# Altium footprint library LimeMicroAltiumLib.PcbLib: 876 footprints (part 5 of 57)
Each footprint in its own frame and in the unit in brackets; x right, y up, seen from the top. Pads: shape width x height; smd on the part's side, far side on the other; paste and mask are expansions set on the pad; w line width, h text height; cw(c..) or ccw(c..) is an arc to the next point about the centre after c.
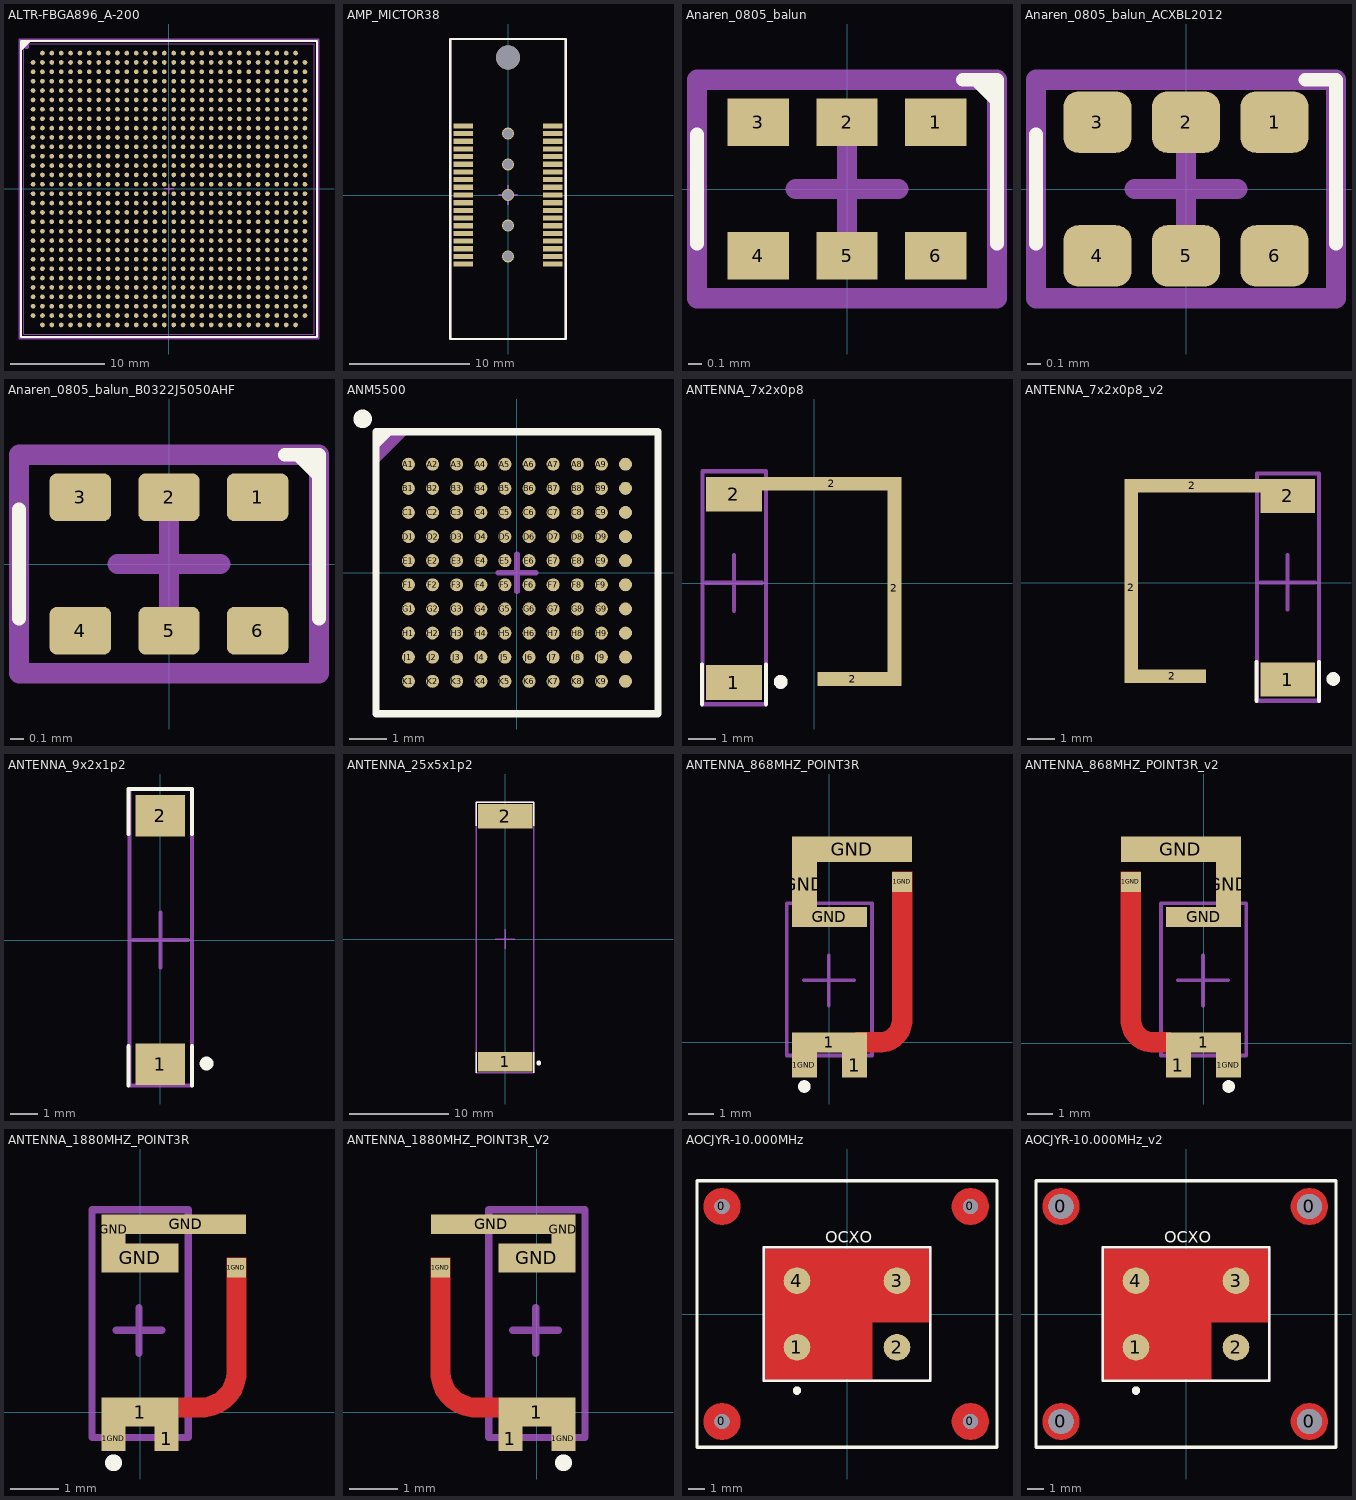
[diagram p4: the footprints below, top view; thin cyan lines are the x and y axes]

## ALTR-FBGA896_A-200 [mm] "BGA, 896-Balls, Body 31x31mm, Pitch 1mm"
height 2
pads (896):
  round 0.5 smd: A2(-13.5,14.5) A3(-12.5,14.5) A4(-11.5,14.5) A5(-10.5,14.5) A6(-9.5,14.5) A7(-8.5,14.5) A8(-7.5,14.5) A9(-6.5,14.5) A10(-5.5,14.5) A11(-4.5,14.5) A12(-3.5,14.5) A13(-2.5,14.5) A14(-1.5,14.5) A15(-0.5,14.5) A16(0.5,14.5) A17(1.5,14.5) A18(2.5,14.5) A19(3.5,14.5) A20(4.5,14.5) A21(5.5,14.5) A22(6.5,14.5) A23(7.5,14.5) A24(8.5,14.5) A25(9.5,14.5) A26(10.5,14.5) A27(11.5,14.5) A28(12.5,14.5) A29(13.5,14.5) AA1(-14.5,-5.5) AA2(-13.5,-5.5) AA3(-12.5,-5.5) AA4(-11.5,-5.5) AA5(-10.5,-5.5) AA6(-9.5,-5.5) AA7(-8.5,-5.5) AA8(-7.5,-5.5) AA9(-6.5,-5.5) AA10(-5.5,-5.5) AA11(-4.5,-5.5) AA12(-3.5,-5.5) AA13(-2.5,-5.5) AA14(-1.5,-5.5) AA15(-0.5,-5.5) AA16(0.5,-5.5) AA17(1.5,-5.5) AA18(2.5,-5.5) AA19(3.5,-5.5) AA20(4.5,-5.5) AA21(5.5,-5.5) AA22(6.5,-5.5) AA23(7.5,-5.5) AA24(8.5,-5.5) AA25(9.5,-5.5) AA26(10.5,-5.5) AA27(11.5,-5.5) AA28(12.5,-5.5) AA29(13.5,-5.5) AA30(14.5,-5.5) AB1(-14.5,-6.5) AB2(-13.5,-6.5) AB3(-12.5,-6.5) AB4(-11.5,-6.5) AB5(-10.5,-6.5) AB6(-9.5,-6.5) AB7(-8.5,-6.5) AB8(-7.5,-6.5) AB9(-6.5,-6.5) AB10(-5.5,-6.5) AB11(-4.5,-6.5) AB12(-3.5,-6.5) AB13(-2.5,-6.5) AB14(-1.5,-6.5) AB15(-0.5,-6.5) AB16(0.5,-6.5) AB17(1.5,-6.5) AB18(2.5,-6.5) AB19(3.5,-6.5) AB20(4.5,-6.5) AB21(5.5,-6.5) AB22(6.5,-6.5) AB23(7.5,-6.5) AB24(8.5,-6.5) AB25(9.5,-6.5) AB26(10.5,-6.5) AB27(11.5,-6.5) AB28(12.5,-6.5) AB29(13.5,-6.5) AB30(14.5,-6.5) AC1(-14.5,-7.5) AC2(-13.5,-7.5) AC3(-12.5,-7.5) AC4(-11.5,-7.5) AC5(-10.5,-7.5) AC6(-9.5,-7.5) AC7(-8.5,-7.5) AC8(-7.5,-7.5) AC9(-6.5,-7.5) AC10(-5.5,-7.5) AC11(-4.5,-7.5) AC12(-3.5,-7.5) AC13(-2.5,-7.5) AC14(-1.5,-7.5) AC15(-0.5,-7.5) AC16(0.5,-7.5) AC17(1.5,-7.5) AC18(2.5,-7.5) AC19(3.5,-7.5) AC20(4.5,-7.5) AC21(5.5,-7.5) AC22(6.5,-7.5) AC23(7.5,-7.5) AC24(8.5,-7.5) AC25(9.5,-7.5) AC26(10.5,-7.5) AC27(11.5,-7.5) AC28(12.5,-7.5) AC29(13.5,-7.5) AC30(14.5,-7.5) AD1(-14.5,-8.5) AD2(-13.5,-8.5) AD3(-12.5,-8.5) AD4(-11.5,-8.5) AD5(-10.5,-8.5) AD6(-9.5,-8.5) AD7(-8.5,-8.5) AD8(-7.5,-8.5) AD9(-6.5,-8.5) AD10(-5.5,-8.5) AD11(-4.5,-8.5) AD12(-3.5,-8.5) AD13(-2.5,-8.5) AD14(-1.5,-8.5) AD15(-0.5,-8.5) AD16(0.5,-8.5) AD17(1.5,-8.5) AD18(2.5,-8.5) AD19(3.5,-8.5) AD20(4.5,-8.5) AD21(5.5,-8.5) AD22(6.5,-8.5) AD23(7.5,-8.5) AD24(8.5,-8.5) AD25(9.5,-8.5) AD26(10.5,-8.5) AD27(11.5,-8.5) AD28(12.5,-8.5) AD29(13.5,-8.5) AD30(14.5,-8.5) AE1(-14.5,-9.5) AE2(-13.5,-9.5) AE3(-12.5,-9.5) AE4(-11.5,-9.5) AE5(-10.5,-9.5) AE6(-9.5,-9.5) AE7(-8.5,-9.5) AE8(-7.5,-9.5) AE9(-6.5,-9.5) AE10(-5.5,-9.5) AE11(-4.5,-9.5) AE12(-3.5,-9.5) AE13(-2.5,-9.5) AE14(-1.5,-9.5) AE15(-0.5,-9.5) AE16(0.5,-9.5) AE17(1.5,-9.5) AE18(2.5,-9.5) AE19(3.5,-9.5) AE20(4.5,-9.5) AE21(5.5,-9.5) AE22(6.5,-9.5) AE23(7.5,-9.5) AE24(8.5,-9.5) AE25(9.5,-9.5) AE26(10.5,-9.5) AE27(11.5,-9.5) AE28(12.5,-9.5) AE29(13.5,-9.5) AE30(14.5,-9.5) AF1(-14.5,-10.5) AF2(-13.5,-10.5) AF3(-12.5,-10.5) AF4(-11.5,-10.5) AF5(-10.5,-10.5) AF6(-9.5,-10.5) AF7(-8.5,-10.5) AF8(-7.5,-10.5) AF9(-6.5,-10.5) AF10(-5.5,-10.5) AF11(-4.5,-10.5) AF12(-3.5,-10.5) AF13(-2.5,-10.5) AF14(-1.5,-10.5) AF15(-0.5,-10.5) AF16(0.5,-10.5) AF17(1.5,-10.5) AF18(2.5,-10.5) AF19(3.5,-10.5) AF20(4.5,-10.5) AF21(5.5,-10.5) AF22(6.5,-10.5) AF23(7.5,-10.5) AF24(8.5,-10.5) AF25(9.5,-10.5) AF26(10.5,-10.5) AF27(11.5,-10.5) AF28(12.5,-10.5) AF29(13.5,-10.5) AF30(14.5,-10.5) AG1(-14.5,-11.5) AG2(-13.5,-11.5) AG3(-12.5,-11.5) AG4(-11.5,-11.5) AG5(-10.5,-11.5) AG6(-9.5,-11.5) AG7(-8.5,-11.5) AG8(-7.5,-11.5) AG9(-6.5,-11.5) AG10(-5.5,-11.5) AG11(-4.5,-11.5) AG12(-3.5,-11.5) AG13(-2.5,-11.5) AG14(-1.5,-11.5) AG15(-0.5,-11.5) AG16(0.5,-11.5) AG17(1.5,-11.5) AG18(2.5,-11.5) AG19(3.5,-11.5) AG20(4.5,-11.5) AG21(5.5,-11.5) AG22(6.5,-11.5) AG23(7.5,-11.5) AG24(8.5,-11.5) AG25(9.5,-11.5) AG26(10.5,-11.5) AG27(11.5,-11.5) AG28(12.5,-11.5) AG29(13.5,-11.5) AG30(14.5,-11.5) AH1(-14.5,-12.5) AH2(-13.5,-12.5) AH3(-12.5,-12.5) AH4(-11.5,-12.5) AH5(-10.5,-12.5) AH6(-9.5,-12.5) AH7(-8.5,-12.5) AH8(-7.5,-12.5) AH9(-6.5,-12.5) AH10(-5.5,-12.5) AH11(-4.5,-12.5) AH12(-3.5,-12.5) AH13(-2.5,-12.5) AH14(-1.5,-12.5) AH15(-0.5,-12.5) AH16(0.5,-12.5) AH17(1.5,-12.5) AH18(2.5,-12.5) AH19(3.5,-12.5) AH20(4.5,-12.5) AH21(5.5,-12.5) AH22(6.5,-12.5) AH23(7.5,-12.5) AH24(8.5,-12.5) AH25(9.5,-12.5) AH26(10.5,-12.5) AH27(11.5,-12.5) AH28(12.5,-12.5) AH29(13.5,-12.5) AH30(14.5,-12.5) AJ1(-14.5,-13.5) AJ2(-13.5,-13.5) AJ3(-12.5,-13.5) AJ4(-11.5,-13.5) AJ5(-10.5,-13.5) AJ6(-9.5,-13.5) AJ7(-8.5,-13.5) AJ8(-7.5,-13.5) AJ9(-6.5,-13.5) AJ10(-5.5,-13.5) AJ11(-4.5,-13.5) AJ12(-3.5,-13.5) AJ13(-2.5,-13.5) AJ14(-1.5,-13.5) AJ15(-0.5,-13.5) AJ16(0.5,-13.5) AJ17(1.5,-13.5) AJ18(2.5,-13.5) AJ19(3.5,-13.5) AJ20(4.5,-13.5) AJ21(5.5,-13.5) AJ22(6.5,-13.5) AJ23(7.5,-13.5) AJ24(8.5,-13.5) AJ25(9.5,-13.5) AJ26(10.5,-13.5) AJ27(11.5,-13.5) AJ28(12.5,-13.5) AJ29(13.5,-13.5) AJ30(14.5,-13.5) AK2(-13.5,-14.5) AK3(-12.5,-14.5) AK4(-11.5,-14.5) AK5(-10.5,-14.5) AK6(-9.5,-14.5) AK7(-8.5,-14.5) AK8(-7.5,-14.5) AK9(-6.5,-14.5) AK10(-5.5,-14.5) AK11(-4.5,-14.5) AK12(-3.5,-14.5) AK13(-2.5,-14.5) AK14(-1.5,-14.5) AK15(-0.5,-14.5) AK16(0.5,-14.5) AK17(1.5,-14.5) AK18(2.5,-14.5) AK19(3.5,-14.5) AK20(4.5,-14.5) AK21(5.5,-14.5) AK22(6.5,-14.5) AK23(7.5,-14.5) AK24(8.5,-14.5) AK25(9.5,-14.5) AK26(10.5,-14.5) AK27(11.5,-14.5) AK28(12.5,-14.5) AK29(13.5,-14.5) B1(-14.5,13.5) B2(-13.5,13.5) B3(-12.5,13.5) B4(-11.5,13.5) B5(-10.5,13.5) B6(-9.5,13.5) B7(-8.5,13.5) B8(-7.5,13.5) B9(-6.5,13.5) B10(-5.5,13.5) B11(-4.5,13.5) B12(-3.5,13.5) B13(-2.5,13.5) B14(-1.5,13.5) B15(-0.5,13.5) B16(0.5,13.5) B17(1.5,13.5) B18(2.5,13.5) B19(3.5,13.5) B20(4.5,13.5) B21(5.5,13.5) B22(6.5,13.5) B23(7.5,13.5) B24(8.5,13.5) B25(9.5,13.5) B26(10.5,13.5) B27(11.5,13.5) B28(12.5,13.5) B29(13.5,13.5) B30(14.5,13.5) C1(-14.5,12.5) C2(-13.5,12.5) C3(-12.5,12.5) C4(-11.5,12.5) C5(-10.5,12.5) C6(-9.5,12.5) C7(-8.5,12.5) C8(-7.5,12.5) C9(-6.5,12.5) C10(-5.5,12.5) C11(-4.5,12.5) C12(-3.5,12.5) C13(-2.5,12.5) C14(-1.5,12.5) C15(-0.5,12.5) C16(0.5,12.5) C17(1.5,12.5) C18(2.5,12.5) C19(3.5,12.5) C20(4.5,12.5) C21(5.5,12.5) C22(6.5,12.5) C23(7.5,12.5) C24(8.5,12.5) C25(9.5,12.5) C26(10.5,12.5) C27(11.5,12.5) C28(12.5,12.5) C29(13.5,12.5) C30(14.5,12.5) D1(-14.5,11.5) D2(-13.5,11.5) D3(-12.5,11.5) D4(-11.5,11.5) D5(-10.5,11.5) D6(-9.5,11.5) D7(-8.5,11.5) D8(-7.5,11.5) D9(-6.5,11.5) D10(-5.5,11.5) D11(-4.5,11.5) D12(-3.5,11.5) D13(-2.5,11.5) D14(-1.5,11.5) D15(-0.5,11.5) D16(0.5,11.5) D17(1.5,11.5) D18(2.5,11.5) D19(3.5,11.5) D20(4.5,11.5) D21(5.5,11.5) D22(6.5,11.5) D23(7.5,11.5) D24(8.5,11.5) D25(9.5,11.5) D26(10.5,11.5) D27(11.5,11.5) D28(12.5,11.5) D29(13.5,11.5) D30(14.5,11.5) E1(-14.5,10.5) E2(-13.5,10.5) E3(-12.5,10.5) E4(-11.5,10.5) E5(-10.5,10.5) E6(-9.5,10.5) E7(-8.5,10.5) E8(-7.5,10.5) E9(-6.5,10.5) E10(-5.5,10.5) E11(-4.5,10.5) E12(-3.5,10.5) E13(-2.5,10.5) E14(-1.5,10.5) E15(-0.5,10.5) E16(0.5,10.5) E17(1.5,10.5) E18(2.5,10.5) E19(3.5,10.5) E20(4.5,10.5) E21(5.5,10.5) E22(6.5,10.5) E23(7.5,10.5) E24(8.5,10.5) E25(9.5,10.5) E26(10.5,10.5) E27(11.5,10.5) E28(12.5,10.5) E29(13.5,10.5) E30(14.5,10.5) F1(-14.5,9.5) F2(-13.5,9.5) F3(-12.5,9.5) F4(-11.5,9.5) F5(-10.5,9.5) F6(-9.5,9.5) F7(-8.5,9.5) F8(-7.5,9.5) F9(-6.5,9.5) F10(-5.5,9.5) F11(-4.5,9.5) F12(-3.5,9.5) F13(-2.5,9.5) F14(-1.5,9.5) F15(-0.5,9.5) F16(0.5,9.5) F17(1.5,9.5) F18(2.5,9.5) F19(3.5,9.5) F20(4.5,9.5) F21(5.5,9.5) F22(6.5,9.5) F23(7.5,9.5) F24(8.5,9.5) F25(9.5,9.5) F26(10.5,9.5) F27(11.5,9.5) F28(12.5,9.5) F29(13.5,9.5) F30(14.5,9.5) G1(-14.5,8.5) G2(-13.5,8.5) G3(-12.5,8.5) G4(-11.5,8.5) G5(-10.5,8.5) G6(-9.5,8.5) G7(-8.5,8.5) G8(-7.5,8.5) G9(-6.5,8.5) G10(-5.5,8.5) G11(-4.5,8.5) G12(-3.5,8.5) G13(-2.5,8.5) G14(-1.5,8.5) G15(-0.5,8.5) G16(0.5,8.5) G17(1.5,8.5) G18(2.5,8.5) G19(3.5,8.5) G20(4.5,8.5) G21(5.5,8.5) G22(6.5,8.5) G23(7.5,8.5) G24(8.5,8.5) G25(9.5,8.5) G26(10.5,8.5) G27(11.5,8.5) G28(12.5,8.5) G29(13.5,8.5) G30(14.5,8.5) H1(-14.5,7.5) H2(-13.5,7.5) H3(-12.5,7.5) H4(-11.5,7.5) H5(-10.5,7.5) H6(-9.5,7.5) H7(-8.5,7.5) H8(-7.5,7.5) H9(-6.5,7.5) H10(-5.5,7.5) H11(-4.5,7.5) H12(-3.5,7.5) H13(-2.5,7.5) H14(-1.5,7.5) H15(-0.5,7.5) H16(0.5,7.5) H17(1.5,7.5) H18(2.5,7.5) H19(3.5,7.5) H20(4.5,7.5) H21(5.5,7.5) H22(6.5,7.5) H23(7.5,7.5) H24(8.5,7.5) H25(9.5,7.5) H26(10.5,7.5) H27(11.5,7.5) H28(12.5,7.5) H29(13.5,7.5) H30(14.5,7.5) J1(-14.5,6.5) J2(-13.5,6.5) J3(-12.5,6.5) J4(-11.5,6.5) J5(-10.5,6.5) J6(-9.5,6.5) J7(-8.5,6.5) J8(-7.5,6.5) J9(-6.5,6.5) J10(-5.5,6.5) J11(-4.5,6.5) J12(-3.5,6.5) J13(-2.5,6.5) J14(-1.5,6.5) J15(-0.5,6.5) J16(0.5,6.5) J17(1.5,6.5) J18(2.5,6.5) J19(3.5,6.5) J20(4.5,6.5) J21(5.5,6.5) J22(6.5,6.5) J23(7.5,6.5) J24(8.5,6.5) J25(9.5,6.5) J26(10.5,6.5) J27(11.5,6.5) J28(12.5,6.5) J29(13.5,6.5) J30(14.5,6.5) K1(-14.5,5.5) K2(-13.5,5.5) K3(-12.5,5.5) K4(-11.5,5.5) K5(-10.5,5.5) K6(-9.5,5.5) K7(-8.5,5.5) K8(-7.5,5.5) K9(-6.5,5.5) K10(-5.5,5.5) K11(-4.5,5.5) K12(-3.5,5.5) K13(-2.5,5.5) K14(-1.5,5.5) K15(-0.5,5.5) K16(0.5,5.5) K17(1.5,5.5) K18(2.5,5.5) K19(3.5,5.5) K20(4.5,5.5) K21(5.5,5.5) K22(6.5,5.5) K23(7.5,5.5) K24(8.5,5.5) K25(9.5,5.5) K26(10.5,5.5) K27(11.5,5.5) K28(12.5,5.5) K29(13.5,5.5) K30(14.5,5.5) L1(-14.5,4.5) L2(-13.5,4.5) L3(-12.5,4.5) L4(-11.5,4.5) L5(-10.5,4.5) L6(-9.5,4.5) L7(-8.5,4.5) L8(-7.5,4.5) L9(-6.5,4.5) L10(-5.5,4.5) L11(-4.5,4.5) L12(-3.5,4.5) L13(-2.5,4.5) L14(-1.5,4.5) L15(-0.5,4.5) L16(0.5,4.5) L17(1.5,4.5) L18(2.5,4.5) L19(3.5,4.5) L20(4.5,4.5) L21(5.5,4.5) L22(6.5,4.5) L23(7.5,4.5) L24(8.5,4.5) L25(9.5,4.5) L26(10.5,4.5) L27(11.5,4.5) L28(12.5,4.5) L29(13.5,4.5) L30(14.5,4.5) M1(-14.5,3.5) M2(-13.5,3.5) M3(-12.5,3.5) M4(-11.5,3.5) M5(-10.5,3.5) M6(-9.5,3.5) M7(-8.5,3.5) M8(-7.5,3.5) M9(-6.5,3.5) M10(-5.5,3.5) M11(-4.5,3.5) M12(-3.5,3.5) M13(-2.5,3.5) M14(-1.5,3.5) M15(-0.5,3.5) M16(0.5,3.5) M17(1.5,3.5) M18(2.5,3.5) M19(3.5,3.5) M20(4.5,3.5) M21(5.5,3.5) M22(6.5,3.5) M23(7.5,3.5) M24(8.5,3.5) M25(9.5,3.5) M26(10.5,3.5) M27(11.5,3.5) M28(12.5,3.5) M29(13.5,3.5) M30(14.5,3.5) N1(-14.5,2.5) N2(-13.5,2.5) N3(-12.5,2.5) N4(-11.5,2.5) N5(-10.5,2.5) N6(-9.5,2.5) N7(-8.5,2.5) N8(-7.5,2.5) N9(-6.5,2.5) N10(-5.5,2.5) N11(-4.5,2.5) N12(-3.5,2.5) N13(-2.5,2.5) N14(-1.5,2.5) N15(-0.5,2.5) N16(0.5,2.5) N17(1.5,2.5) N18(2.5,2.5) N19(3.5,2.5) N20(4.5,2.5) N21(5.5,2.5) N22(6.5,2.5) N23(7.5,2.5) N24(8.5,2.5) N25(9.5,2.5) N26(10.5,2.5) N27(11.5,2.5) N28(12.5,2.5) N29(13.5,2.5) N30(14.5,2.5) P1(-14.5,1.5) P2(-13.5,1.5) P3(-12.5,1.5) P4(-11.5,1.5) P5(-10.5,1.5) P6(-9.5,1.5) P7(-8.5,1.5) P8(-7.5,1.5) P9(-6.5,1.5) P10(-5.5,1.5) P11(-4.5,1.5) P12(-3.5,1.5) P13(-2.5,1.5) P14(-1.5,1.5) P15(-0.5,1.5) P16(0.5,1.5) P17(1.5,1.5) P18(2.5,1.5) P19(3.5,1.5) P20(4.5,1.5) P21(5.5,1.5) P22(6.5,1.5) P23(7.5,1.5) P24(8.5,1.5) P25(9.5,1.5) P26(10.5,1.5) P27(11.5,1.5) P28(12.5,1.5) P29(13.5,1.5) P30(14.5,1.5) R1(-14.5,0.5) R2(-13.5,0.5) R3(-12.5,0.5) R4(-11.5,0.5) R5(-10.5,0.5) R6(-9.5,0.5) R7(-8.5,0.5) R8(-7.5,0.5) R9(-6.5,0.5) R10(-5.5,0.5) R11(-4.5,0.5) R12(-3.5,0.5) R13(-2.5,0.5) R14(-1.5,0.5) R15(-0.5,0.5) R16(0.5,0.5) R17(1.5,0.5) R18(2.5,0.5) R19(3.5,0.5) R20(4.5,0.5) R21(5.5,0.5) R22(6.5,0.5) R23(7.5,0.5) R24(8.5,0.5) R25(9.5,0.5) R26(10.5,0.5) R27(11.5,0.5) R28(12.5,0.5) R29(13.5,0.5) R30(14.5,0.5) T1(-14.5,-0.5) T2(-13.5,-0.5) T3(-12.5,-0.5) T4(-11.5,-0.5) T5(-10.5,-0.5) T6(-9.5,-0.5) T7(-8.5,-0.5) T8(-7.5,-0.5) T9(-6.5,-0.5) T10(-5.5,-0.5) T11(-4.5,-0.5) T12(-3.5,-0.5) T13(-2.5,-0.5) T14(-1.5,-0.5) T15(-0.5,-0.5) T16(0.5,-0.5) T17(1.5,-0.5) T18(2.5,-0.5) T19(3.5,-0.5) T20(4.5,-0.5) T21(5.5,-0.5) T22(6.5,-0.5) T23(7.5,-0.5) T24(8.5,-0.5) T25(9.5,-0.5) T26(10.5,-0.5) T27(11.5,-0.5) T28(12.5,-0.5) T29(13.5,-0.5) T30(14.5,-0.5) U1(-14.5,-1.5) U2(-13.5,-1.5) U3(-12.5,-1.5) U4(-11.5,-1.5) U5(-10.5,-1.5) U6(-9.5,-1.5) U7(-8.5,-1.5) U8(-7.5,-1.5) U9(-6.5,-1.5) U10(-5.5,-1.5) U11(-4.5,-1.5) U12(-3.5,-1.5) U13(-2.5,-1.5) U14(-1.5,-1.5) U15(-0.5,-1.5) U16(0.5,-1.5) U17(1.5,-1.5) U18(2.5,-1.5) U19(3.5,-1.5) U20(4.5,-1.5) U21(5.5,-1.5) U22(6.5,-1.5) U23(7.5,-1.5) U24(8.5,-1.5) U25(9.5,-1.5) U26(10.5,-1.5) U27(11.5,-1.5) U28(12.5,-1.5) U29(13.5,-1.5) U30(14.5,-1.5) V1(-14.5,-2.5) V2(-13.5,-2.5) V3(-12.5,-2.5) V4(-11.5,-2.5) V5(-10.5,-2.5) V6(-9.5,-2.5) V7(-8.5,-2.5) V8(-7.5,-2.5) V9(-6.5,-2.5) V10(-5.5,-2.5) V11(-4.5,-2.5) V12(-3.5,-2.5) V13(-2.5,-2.5) V14(-1.5,-2.5) V15(-0.5,-2.5) V16(0.5,-2.5) V17(1.5,-2.5) V18(2.5,-2.5) V19(3.5,-2.5) V20(4.5,-2.5) V21(5.5,-2.5) V22(6.5,-2.5) V23(7.5,-2.5) V24(8.5,-2.5) V25(9.5,-2.5) V26(10.5,-2.5) V27(11.5,-2.5) V28(12.5,-2.5) V29(13.5,-2.5) V30(14.5,-2.5) W1(-14.5,-3.5) W2(-13.5,-3.5) W3(-12.5,-3.5) W4(-11.5,-3.5) W5(-10.5,-3.5) W6(-9.5,-3.5) W7(-8.5,-3.5) W8(-7.5,-3.5) W9(-6.5,-3.5) W10(-5.5,-3.5) W11(-4.5,-3.5) W12(-3.5,-3.5) W13(-2.5,-3.5) W14(-1.5,-3.5) W15(-0.5,-3.5) W16(0.5,-3.5) W17(1.5,-3.5) W18(2.5,-3.5) W19(3.5,-3.5) W20(4.5,-3.5) W21(5.5,-3.5) W22(6.5,-3.5) W23(7.5,-3.5) W24(8.5,-3.5) W25(9.5,-3.5) W26(10.5,-3.5) W27(11.5,-3.5) W28(12.5,-3.5) W29(13.5,-3.5) W30(14.5,-3.5) Y1(-14.5,-4.5) Y2(-13.5,-4.5) Y3(-12.5,-4.5) Y4(-11.5,-4.5) Y5(-10.5,-4.5) Y6(-9.5,-4.5) Y7(-8.5,-4.5) Y8(-7.5,-4.5) Y9(-6.5,-4.5) Y10(-5.5,-4.5) Y11(-4.5,-4.5) Y12(-3.5,-4.5) Y13(-2.5,-4.5) Y14(-1.5,-4.5) Y15(-0.5,-4.5) Y16(0.5,-4.5) Y17(1.5,-4.5) Y18(2.5,-4.5) Y19(3.5,-4.5) Y20(4.5,-4.5) Y21(5.5,-4.5) Y22(6.5,-4.5) Y23(7.5,-4.5) Y24(8.5,-4.5) Y25(9.5,-4.5) Y26(10.5,-4.5) Y27(11.5,-4.5) Y28(12.5,-4.5) Y29(13.5,-4.5) Y30(14.5,-4.5)
Top Overlay:
  region: -14.8,15.8 -15.8,14.8 -15.8,15.8
  lines w0.2: -15.8,14.8 -14.8,15.8 ; -15.8,-15.8 -15.8,15.8 15.8,15.8 15.8,-15.8 -15.8,-15.8
Mechanical 13:
  lines w0.1: -15.5,-15.5 -15.5,15.5 15.5,15.5 15.5,-15.5 -15.5,-15.5
Mechanical 15:
  circle w0.35: c-15.2,15.2 r0.1
  lines w0.15: -0.5,0 0.5,0 ; 0,-0.5 0,0.5 ; -16,-16 -16,16 16,16 16,-16 -16,-16
  text ".Designator" at 0,0 h0.55
3D body: height 2.01, standoff 1, extent -14.897,14.101 -14.1,14.899
3D body: height 2, standoff 0.4, extent -15.5,-15.5 15.5,15.5

## AMP_MICTOR38 [mm]
pads (38):
  rect 1.6x0.43 smd mask+0.05: 1(-3.73,5.76) 2(3.73,5.76) 3(-3.73,5.12) 4(3.73,5.12) 5(-3.73,4.48) 6(3.73,4.48) 7(-3.73,3.84) 8(3.73,3.84) 9(-3.73,3.2) 10(3.73,3.2) 11(-3.73,2.56) 12(3.73,2.56) 13(-3.73,1.92) 14(3.73,1.92) 15(-3.73,1.28) 16(3.73,1.28) 17(-3.73,0.64) 18(3.73,0.64) 19(-3.73,0) 20(3.73,0) 21(-3.73,-0.64) 22(3.73,-0.64) 23(-3.73,-1.28) 24(3.73,-1.28) 25(-3.73,-1.92) 26(3.73,-1.92) 27(-3.73,-2.56) 28(3.73,-2.56) 29(-3.73,-3.2) 30(3.73,-3.2) 31(-3.73,-3.84) 32(3.73,-3.84) 33(-3.73,-4.48) 34(3.73,-4.48) 35(-3.73,-5.12) 36(3.73,-5.12) 37(-3.73,-5.76) 38(3.73,-5.76)
via 0,2.56 diameter 1 hole 0.8
via 0,0 diameter 1 hole 0.8
via 0,-2.56 diameter 1 hole 0.8
via 0,-5.12 diameter 1 hole 0.8
via 0,5.12 diameter 1 hole 0.8
via 0,11.475 diameter 2 hole 2
Top Overlay:
  lines w0.2: -4.8,-12 -4.8,13 4.8,13 4.8,-12 -4.8,-12
Mechanical 15:
  lines w0.15: -0.75,0 0,0 ; 0,-0.75 0,0 ; 0,0.75 0,0 ; 0.75,0 0,0 ; -4.8,-12 -4.8,13 4.8,13 4.8,-12 -4.8,-12
  text "38" at 2,-7.7 h0.55
  text "37" at -3.6,-7.8 h0.55
  text "2" at 3.1,6.5 h0.55
  text "1" at -3.6,6.5 h0.55
  text ".Designator" at 0,0 h0.55
3D body "52r4246_5767096-8.stp": height 6.1, standoff -1.29, extent -4.356,-12.65 4.356,12.75

## Anaren_0805_balun [mm] "B0430J50100AHF anaren smd 0.4 GHz - 3 GHz balun"
height 0.7
pads (6):
  rect 0.45x0.35 smd mask+0.05: 1(0.65,0.49) 2(0,0.49) 3(-0.65,0.49) 4(-0.65,-0.49) 5(0,-0.49) 6(0.65,-0.49)
Top Overlay:
  lines w0.1: -1.1,-0.4 -1.1,0.4 ; 0.85,0.8 1.1,0.8 1.1,-0.4 ; 0.95,0.8 1.1,0.65
Mechanical 15:
  lines w0.15: -0.375,0 0,0 ; 0,-0.375 0,0 ; 0,0.375 0,0 ; 0.375,0 0,0 ; -1.1,-0.8 1.1,-0.8 1.1,0.8 -1.1,0.8 -1.1,-0.8
  text ".Designator" at 0,0 h0.55
Mechanical 15 keep-out:
  circle w0.1: c0.65,0.45 r0.035
3D body: height 0.71, standoff 0.7, extent 0.65,-0.1 0.85,0.1
3D body: height 0.7, standoff 0, extent -1.025,-0.65 1.025,0.65

## Anaren_0805_balun_ACXBL2012 [mm] "B0430J50100AHF anaren smd 0.4 GHz - 3 GHz balun or ACX BL2012-07M1350RK 400MHz - 2700 MHz"
height 0.7
pads (6):
  rrect50% 0.5x0.45 smd mask+0.05: 1(0.65,0.49) 2(0,0.49) 3(-0.65,0.49) 4(-0.65,-0.49) 5(0,-0.49) 6(0.65,-0.49)
Top Overlay:
  lines w0.1: -1.1,-0.4 -1.1,0.4 ; 0.875,0.8 1.1,0.8 1.1,-0.4
Mechanical 15:
  circle w0.3: c0.6,0.45 r0.035
  lines w0.15: -0.375,0 0,0 ; 0,-0.375 0,0 ; 0,0.375 0,0 ; 0.375,0 0,0 ; -1.1,-0.8 -1.1,0.8 1.1,0.8 1.1,-0.8 -1.1,-0.8
  text ".Designator" at 0,0 h0.55
3D body: height 0.6, standoff 0, extent -0.15,-0.625 0.15,-0.475
3D body: height 0.6, standoff 0, extent 0.513,-0.625 0.813,-0.475
3D body: height 0.6, standoff 0, extent -0.812,-0.625 -0.512,-0.475
3D body: height 0.6, standoff 0, extent 0.512,0.475 0.813,0.625
3D body: height 0.6, standoff 0, extent -0.812,0.475 -0.512,0.625
3D body: height 0.6, standoff 0, extent 0.463,-0.075 0.663,0.15
3D body: height 0.6, standoff 0, extent -0.15,0.475 0.15,0.625
3D body: height 0.6, standoff 0, extent -0.862,-0.6 0.863,0.6
3D body: height 0.7, standoff 0, extent -1.025,-0.65 1.025,0.65
3D body: height 0.71, standoff 0.7, extent 0.65,-0.1 0.85,0.1

## Anaren_0805_balun_B0322J5050AHF [mm] "B0430J50100AHF anaren smd 0.4 GHz - 3 GHz balun"
height 0.7
pads (6):
  rrect30% 0.45x0.35 smd mask+0.05: 1(0.65,0.49) 2(0,0.49) 3(-0.65,0.49) 4(-0.65,-0.49) 5(0,-0.49) 6(0.65,-0.49)
Top Overlay:
  lines w0.1: -1.1,-0.4 -1.1,0.4 ; 0.85,0.8 1.1,0.8 1.1,-0.4 ; 0.95,0.8 1.1,0.65
Mechanical 15:
  lines w0.15: -0.375,0 0,0 ; 0,-0.375 0,0 ; 0,0.375 0,0 ; 0.375,0 0,0 ; -1.1,-0.8 -1.1,0.8 1.1,0.8 1.1,-0.8 -1.1,-0.8
  text ".Designator" at 0,0 h0.55
Mechanical 15 keep-out:
  circle w0.1: c0.65,0.45 r0.035
3D body: height 0.7, standoff 0, extent -1.025,-0.65 1.025,0.65
3D body: height 0.71, standoff 0.7, extent 0.65,-0.1 0.85,0.1

## ANM5500 [mm]
pads (100):
  round 0.35 smd mask+0.07: A1(-2.925,2.925) A2(-2.275,2.925) A3(-1.625,2.925) A4(-0.975,2.925) A5(-0.325,2.925) A6(0.325,2.925) A7(0.975,2.925) A8(1.625,2.925) A9(2.275,2.925) A10(2.925,2.925) B1(-2.925,2.275) B2(-2.275,2.275) B3(-1.625,2.275) B4(-0.975,2.275) B5(-0.325,2.275) B6(0.325,2.275) B7(0.975,2.275) B8(1.625,2.275) B9(2.275,2.275) B10(2.925,2.275) C1(-2.925,1.625) C2(-2.275,1.625) C3(-1.625,1.625) C4(-0.975,1.625) C5(-0.325,1.625) C6(0.325,1.625) C7(0.975,1.625) C8(1.625,1.625) C9(2.275,1.625) C10(2.925,1.625) D1(-2.925,0.975) D2(-2.275,0.975) D3(-1.625,0.975) D4(-0.975,0.975) D5(-0.325,0.975) D6(0.325,0.975) D7(0.975,0.975) D8(1.625,0.975) D9(2.275,0.975) D10(2.925,0.975) E1(-2.925,0.325) E2(-2.275,0.325) E3(-1.625,0.325) E4(-0.975,0.325) E5(-0.325,0.325) E6(0.325,0.325) E7(0.975,0.325) E8(1.625,0.325) E9(2.275,0.325) E10(2.925,0.325) F1(-2.925,-0.325) F2(-2.275,-0.325) F3(-1.625,-0.325) F4(-0.975,-0.325) F5(-0.325,-0.325) F6(0.325,-0.325) F7(0.975,-0.325) F8(1.625,-0.325) F9(2.275,-0.325) F10(2.925,-0.325) G1(-2.925,-0.975) G2(-2.275,-0.975) G3(-1.625,-0.975) G4(-0.975,-0.975) G5(-0.325,-0.975) G6(0.325,-0.975) G7(0.975,-0.975) G8(1.625,-0.975) G9(2.275,-0.975) G10(2.925,-0.975) H1(-2.925,-1.625) H2(-2.275,-1.625) H3(-1.625,-1.625) H4(-0.975,-1.625) H5(-0.325,-1.625) H6(0.325,-1.625) H7(0.975,-1.625) H8(1.625,-1.625) H9(2.275,-1.625) H10(2.925,-1.625) J1(-2.925,-2.275) J2(-2.275,-2.275) J3(-1.625,-2.275) J4(-0.975,-2.275) J5(-0.325,-2.275) J6(0.325,-2.275) J7(0.975,-2.275) J8(1.625,-2.275) J9(2.275,-2.275) J10(2.925,-2.275) K1(-2.925,-2.925) K2(-2.275,-2.925) K3(-1.625,-2.925) K4(-0.975,-2.925) K5(-0.325,-2.925) K6(0.325,-2.925) K7(0.975,-2.925) K8(1.625,-2.925) K9(2.275,-2.925) K10(2.925,-2.925)
Top Overlay:
  circle w0.25: c-4.16,4.146 r0.125
  region: -3.435,3.8 -3.8,3.435 -3.8,3.8
  lines w0.2: -3.8,3.435 -3.435,3.8 ; -3.8,-3.8 3.8,-3.8 3.8,3.8 -3.8,3.8 -3.8,-3.8
Mechanical 15:
  region: -3.8,2.9 -2.9,3.8 -3.8,3.8
  lines w0.15: -0.5,0 0,0 ; 0,-0.5 0,0 ; 0,0.5 0,0 ; 0.5,0 0,0 ; -3.8,-3.8 -3.8,3.8 3.8,3.8 3.8,-3.8 -3.8,-3.8
  text ".Designator" at 0,0 h0.55
  text "A1" at -3.2,2.7 h0.43
  text "A10" at 2.4,2.7 h0.43
  text "K1" at -3.2,-3.1 h0.43
  text "K10" at 2.4,-3.1 h0.43
3D body: height 0.6, standoff 0.15, extent -2.998,2.401 -2.4,3
3D body: height 0.6, standoff 0.1, extent -3.5,-3.5 3.5,3.5

## ANTENNA_7x2x0p8 [mm] "0915AT43A0026 915 MHz ISM antenna; johansontechnology"
pads (5):
  rect 2x1.25 smd mask+0.05: 1(-2.875,-3.562) 2(-2.875,3.188)
  rect 5x0.5 smd mask+0.05: 2(0.625,3.563)
  rect 2.5x0.5 smd mask+0.05: 2(1.375,-3.437)
  rect 0.5x7 smd mask+0.05: 2(2.875,-0.187)
Top Overlay:
  circle w0.3: c-1.2,-3.537 r0.1
  lines w0.15: -4.025,-4.337 -4.025,-2.912 ; -1.725,-4.337 -1.725,-2.912
Mechanical 15:
  circle w0.3: c-2.875,-3.587 r0.1
  lines w0.15: -3.875,0.013 -2.875,0.013 ; -2.875,-0.987 -2.875,0.013 ; -2.875,1.013 -2.875,0.013 ; -1.875,0.013 -2.875,0.013 ; -4,-4.337 -1.725,-4.337 -1.725,4.013 -4,4.013 -4,-4.337
  text ".Designator" at -2.875,0.013 h0.55
3D body: height 0.85, standoff 0, extent -3.887,2.881 -1.85,3.394
3D body: height 0.85, standoff 0.01, extent -3.025,-2.65 -2.725,-1.625
3D body: height 0.85, standoff 0, extent -3.887,-3.669 -1.85,-3.156
3D body: height 0.8, standoff 0, extent -3.875,-3.637 -1.875,3.363

## ANTENNA_7x2x0p8_v2 [mm] "0915AT43A0026 915 MHz ISM antenna; johansontechnology"
pads (5):
  rect 2x1.25 smd mask+0.05: 1(-2.875,-3.562) 2(-2.875,3.188)
  rect 0.5x7 smd mask+0.05: 2(-8.625,-0.187)
  rect 2.5x0.5 smd mask+0.05: 2(-7.125,-3.437)
  rect 5x0.5 smd mask+0.05: 2(-6.375,3.563)
Top Overlay:
  circle w0.3: c-1.2,-3.537 r0.1
  lines w0.15: -4.025,-4.337 -4.025,-2.912 ; -1.725,-4.337 -1.725,-2.912
Mechanical 15:
  circle w0.3: c-2.875,-3.587 r0.1
  lines w0.15: -3.875,0.013 -2.875,0.013 ; -2.875,-0.987 -2.875,0.013 ; -2.875,1.013 -2.875,0.013 ; -1.875,0.013 -2.875,0.013 ; -4,-4.337 -1.725,-4.337 -1.725,4.013 -4,4.013 -4,-4.337
  text ".Designator" at -2.875,0.013 h0.55
3D body: height 0.85, standoff 0, extent -3.887,2.881 -1.85,3.394
3D body: height 0.85, standoff 0.01, extent -3.025,-2.65 -2.725,-1.625
3D body: height 0.85, standoff 0, extent -3.887,-3.669 -1.85,-3.156
3D body: height 0.8, standoff 0, extent -3.875,-3.637 -1.875,3.363

## ANTENNA_9x2x1p2 [mm] "2450AT45A100 2450 MHz ISM antenna; johansontechnology"
height 1.2
pads (2):
  rect 1.8x1.5 smd mask+0.05: 1(0,-4.5) 2(0,4.5)
Top Overlay:
  circle w0.3: c1.675,-4.475 r0.1
  lines w0.15: -1.15,-5.275 -1.15,-3.85 ; -1.15,3.85 -1.15,5.275 -1.15,5.475 1.15,5.475 1.15,5.275 1.15,3.85 ; 1.15,-5.275 1.15,-3.85
Mechanical 15:
  circle w0.3: c0,-4.525 r0.1
  lines w0.15: -1,0 0,0 ; 0,-1 0,0 ; 0,1 0,0 ; 1,0 0,0 ; -1.125,-5.275 1.15,-5.275 1.15,5.475 -1.125,5.475 -1.125,-5.275
  text ".Designator" at 0,0 h0.55
3D body: height 1.25, standoff 0, extent -1.019,4.194 1.019,4.706
3D body: height 1.25, standoff 0.01, extent -0.15,-3.825 0.15,-2.8
3D body: height 1.25, standoff 0, extent -1.019,-4.856 1.019,-4.344
3D body: height 1.2, standoff 0, extent -1,-4.825 1,4.675

## ANTENNA_25x5x1p2 [mm] "0433AT62A0020E 433 MHz ISM antenna; johansontechnology"
pads (2):
  rect 5.5x2 smd mask+0.05: 1(0,-12.375)
  rect 5.5x2.5 smd mask+0.05: 2(0,12.375)
Top Overlay:
  circle w0.3: c3.4,-12.5 r0.1
  lines w0.15: -2.9,-13.5 -2.9,-11.4 ; -2.9,11.4 -2.9,13.8 2.9,13.8 2.9,11.4 ; 2.9,-13.5 2.9,-11.4
Mechanical 15:
  circle w0.3: c0,-12.4 r0.1
  lines w0.15: -1,0 0,0 ; 0,-1 0,0 ; 0,1 0,0 ; 1,0 0,0 ; -2.9,-13.5 2.9,-13.5 2.9,13.8 -2.9,13.8 -2.9,-13.5
  text ".Designator" at 0,0 h0.55
3D body: height 1.25, standoff 0.01, extent -0.375,-10.325 0.375,-7.825
3D body: height 1.25, standoff 0, extent -2.525,11.425 2.525,12.45
3D body: height 1.25, standoff 0, extent -2.525,-12.6 2.525,-11.575
3D body: height 1.2, standoff 0, extent -2.5,-12.575 2.5,12.425

## ANTENNA_868MHZ_POINT3R [mm] "PTR-DA-868-5030U 915 MHz ISM/880MHz LTE antenna; point3r"
pads (7):
  rect 3x0.8 smd mask+0.05: 1(0,0) GND(0,5)
  rect 1x1 smd paste-5 mask+0.102: 1(1,-0.9) 1GND(-1,-0.9)
  rect 0.8x0.8 smd paste-5 mask+0.102: 1GND(2.9,6.4)
  rect 1x1.8 smd paste-5 mask+0.102: GND(-1,6.3)
  rect 4.8x1 smd paste-5 mask+0.102: GND(0.9,7.7)
Top Layer:
  region: 2,0.4 2.098,0.41 2.278,0.484 2.416,0.622 2.49,0.802 2.5,0.9 2.5,2.05 3.3,2.05 3.3,0.9 3.3,0.772 3.25,0.521 3.152,0.284 3.01,0.071 2.829,-0.11 2.616,-0.252 2.379,-0.35 2.128,-0.4 2,-0.4
  region: 3.3,1.05 2.5,1.05 2.5,6.8 3.3,6.8
  region: 1.05,-0.4 1.05,0.4 2.098,0.4 2.098,-0.4
Top Overlay:
  circle w0.3: c-1,-1.756 r0.1
Mechanical 15:
  circle w0.3: c0,-0.037 r0.1
  lines w0.15: -1.025,2.475 -0.025,2.475 ; -0.025,1.475 -0.025,2.475 ; -0.025,3.475 -0.025,2.475 ; 0.975,2.475 -0.025,2.475 ; -1.7,-0.525 1.7,-0.525 1.7,5.55 -1.7,5.55 -1.7,-0.525
  text ".Designator" at -0.025,2.475 h0.55
3D body: height 0.55, standoff 0, extent -1.5,-0.031 1.55,0.481
3D body: height 0.55, standoff 0, extent -1.5,4.519 1.55,5.031
3D body: height 0.5, standoff 0, extent -1.475,0 1.525,5

## ANTENNA_868MHZ_POINT3R_v2 [mm] "PTR-DA-868-5030U 915 MHz ISM/880MHz LTE antenna; point3r"
pads (7):
  rect 1x1 smd paste-5 mask+0.102: 1(-1,-0.869) 1GND(1,-0.869)
  rect 3x0.8 smd mask+0.05: 1(0,0.031) GND(0,5.031)
  rect 0.8x0.8 smd paste-5 mask+0.102: 1GND(-2.9,6.431)
  rect 4.8x1 smd paste-5 mask+0.102: GND(-0.9,7.731)
  rect 1x1.8 smd paste-5 mask+0.102: GND(1,6.331)
Top Layer:
  region: -3.3,1.081 -2.5,1.081 -2.5,6.831 -3.3,6.831
  region: -2,0.431 -2.098,0.441 -2.278,0.515 -2.416,0.653 -2.491,0.834 -2.5,0.931 -2.5,1.975 -3.3,1.975 -3.3,0.931 -3.3,0.803 -3.25,0.552 -3.152,0.315 -3.01,0.102 -2.829,-0.079 -2.616,-0.221 -2.379,-0.319 -2.128,-0.369 -2,-0.369
  region: -1.3,-0.369 -1.3,0.431 -2.098,0.431 -2.098,-0.369
Top Overlay:
  circle w0.3: c1,-1.725 r0.1
Mechanical 15:
  circle w0.3: c0,-0.006 r0.1
  lines w0.15: -1.025,2.506 -0.025,2.506 ; -0.025,1.506 -0.025,2.506 ; -0.025,3.506 -0.025,2.506 ; 0.975,2.506 -0.025,2.506 ; -1.7,-0.494 1.7,-0.494 1.7,5.581 -1.7,5.581 -1.7,-0.494
  text ".Designator" at -0.025,2.506 h0.55
3D body: height 0.55, standoff 0, extent -1.525,0 1.525,0.512
3D body: height 0.55, standoff 0, extent -1.525,4.55 1.525,5.062
3D body: height 0.5, standoff 0, extent -1.5,0.031 1.5,5.031

## ANTENNA_1880MHZ_POINT3R [mm] "PTR-DA-1819-3216U  1880-1930 MHz LTE antenna; point3r"
pads (7):
  rect 1.6x0.6 smd mask+0.05: 1(0,0) GND(0,3.2)
  rect 0.5x0.5 smd paste-5 mask+0.102: 1(0.55,-0.55) 1GND(-0.55,-0.55)
  rect 0.4x0.4 smd paste-5 mask+0.102: 1GND(2,3)
  rect 0.5x0.6 smd paste-5 mask+0.102: GND(-0.55,3.8)
  rect 2.5x0.4 smd paste-5 mask+0.102: GND(0.95,3.9)
Top Layer:
  region: 2.2,3.2 1.8,3.2 1.8,0.825 2.2,0.825
  region: 1.25,-0.1 1.25,0.3 0.8,0.3 0.8,-0.1
  region: 0.925,0.3 1.275,0.3 1.377,0.31 1.567,0.388 1.712,0.533 1.79,0.723 1.8,0.825 2.2,0.825 2.2,0.734 2.164,0.555 2.095,0.387 1.993,0.235 1.865,0.107 1.713,0.005 1.545,-0.064 1.366,-0.1 1.275,-0.1 0.925,-0.1
Top Overlay:
  circle w0.3: c-0.55,-1.05 r0.025
Mechanical 15:
  circle w0.3: c0,-0.038 r0.1
  lines w0.15: -0.5,1.7 -0.025,1.7 ; -0.025,1.225 -0.025,1.7 ; -0.025,2.175 -0.025,1.7 ; 0.45,1.7 -0.025,1.7 ; -1,-0.525 1,-0.525 1,4.2 -1,4.2 -1,-0.525
  text ".Designator" at -0.05,1.75 h0.55
3D body: height 0.55, standoff 0, extent -0.825,-0.031 0.825,0.481
3D body: height 0.5, standoff 0, extent -0.8,0 0.8,3.2
3D body: height 0.55, standoff 0, extent -0.825,2.719 0.825,3.231

## ANTENNA_1880MHZ_POINT3R_V2 [mm] "PTR-DA-1819-3216U  1880-1930 MHz LTE antenna; point3r"
pads (7):
  rect 0.5x0.5 smd paste-5 mask+0.102: 1(-0.55,-0.55) 1GND(0.55,-0.55)
  rect 1.6x0.6 smd mask+0.05: 1(0,0) GND(0,3.2)
  rect 0.4x0.4 smd paste-5 mask+0.102: 1GND(-2,3)
  rect 2.5x0.4 smd paste-5 mask+0.102: GND(-0.95,3.9)
  rect 0.5x0.6 smd paste-5 mask+0.102: GND(0.55,3.8)
Top Layer:
  region: -0.8,0.3 -1.275,0.3 -1.377,0.31 -1.567,0.388 -1.712,0.533 -1.79,0.723 -1.8,0.825 -2.2,0.825 -2.2,0.734 -2.164,0.555 -2.095,0.387 -1.993,0.235 -1.865,0.107 -1.713,0.005 -1.545,-0.064 -1.366,-0.1 -1.275,-0.1 -0.8,-0.1
  region: -1.25,-0.1 -1.25,0.3 -0.8,0.3 -0.8,-0.1
  region: -2.2,3.2 -1.8,3.2 -1.8,0.825 -2.2,0.825
Top Overlay:
  circle w0.3: c0.55,-1.05 r0.025
Mechanical 15:
  circle w0.3: c0,-0.038 r0.1
  lines w0.15: -0.5,1.7 -0.025,1.7 ; -0.025,1.225 -0.025,1.7 ; -0.025,2.175 -0.025,1.7 ; 0.45,1.7 -0.025,1.7 ; -1,-0.525 1,-0.525 1,4.2 -1,4.2 -1,-0.525
  text ".Designator" at -0.05,1.75 h0.55
3D body: height 0.55, standoff 0, extent -0.825,-0.031 0.825,0.481
3D body: height 0.5, standoff 0, extent -0.8,0 0.8,3.2
3D body: height 0.55, standoff 0, extent -0.825,2.719 0.825,3.231

## AOCJYR-10.000MHz [mm]
pads (8):
  round 0.9 hole 0.9 unplated: 0(-7.5,6.45) 0(-7.5,-6.45) 0(7.4,-6.45) 0(7.4,6.45)
  round 1.6 smd mask+0.05: 1(-3,-2) 2(3,-2) 3(3,2) 4(-3,2)
Top Layer:
  pour cut-out: 4.9,-0.5 4.9,3.9 -4.9,3.9 -4.9,-3.9 1.525,-3.9 1.525,-0.5
  pour cut-out: 7.4,6.45 7.4,7.55 7.508,7.55 7.721,7.508 7.921,7.425 8.101,7.304 8.254,7.151 8.375,6.971 8.458,6.771 8.5,6.558 8.5,6.45
  pour cut-out: 7.4,6.45 7.4,5.35 7.292,5.35 7.079,5.392 6.879,5.475 6.699,5.596 6.546,5.749 6.425,5.929 6.342,6.129 6.3,6.342 6.3,6.45
  pour cut-out: 7.4,6.45 6.3,6.45 6.3,6.558 6.342,6.771 6.425,6.971 6.546,7.151 6.699,7.304 6.879,7.425 7.079,7.508 7.292,7.55 7.4,7.55
  pour cut-out: 7.4,6.45 8.5,6.45 8.5,6.342 8.458,6.129 8.375,5.929 8.254,5.749 8.101,5.596 7.921,5.475 7.721,5.392 7.508,5.35 7.4,5.35
  pour cut-out: -7.5,6.45 -7.5,7.55 -7.392,7.55 -7.179,7.508 -6.979,7.425 -6.799,7.304 -6.646,7.151 -6.525,6.971 -6.442,6.771 -6.4,6.558 -6.4,6.45
  pour cut-out: -7.5,6.45 -7.5,5.35 -7.608,5.35 -7.821,5.392 -8.021,5.475 -8.201,5.596 -8.354,5.749 -8.475,5.929 -8.558,6.129 -8.6,6.342 -8.6,6.45
  pour cut-out: -7.5,6.45 -8.6,6.45 -8.6,6.558 -8.558,6.771 -8.475,6.971 -8.354,7.151 -8.201,7.304 -8.021,7.425 -7.821,7.508 -7.608,7.55 -7.5,7.55
  pour cut-out: -7.5,6.45 -6.4,6.45 -6.4,6.342 -6.442,6.129 -6.525,5.929 -6.646,5.749 -6.799,5.596 -6.979,5.475 -7.179,5.392 -7.392,5.35 -7.5,5.35
  pour cut-out: -7.5,-6.45 -7.5,-5.35 -7.392,-5.35 -7.179,-5.392 -6.979,-5.475 -6.799,-5.596 -6.646,-5.749 -6.525,-5.929 -6.442,-6.129 -6.4,-6.342 -6.4,-6.45
  pour cut-out: -7.5,-6.45 -7.5,-7.55 -7.608,-7.55 -7.821,-7.508 -8.021,-7.425 -8.201,-7.304 -8.354,-7.151 -8.475,-6.971 -8.558,-6.771 -8.6,-6.558 -8.6,-6.45
  pour cut-out: -7.5,-6.45 -8.6,-6.45 -8.6,-6.342 -8.558,-6.129 -8.475,-5.929 -8.354,-5.749 -8.201,-5.596 -8.021,-5.475 -7.821,-5.392 -7.608,-5.35 -7.5,-5.35
  pour cut-out: -7.5,-6.45 -6.4,-6.45 -6.4,-6.558 -6.442,-6.771 -6.525,-6.971 -6.646,-7.151 -6.799,-7.304 -6.979,-7.425 -7.179,-7.508 -7.392,-7.55 -7.5,-7.55
  pour cut-out: 7.4,-6.45 8.5,-6.45 8.5,-6.558 8.458,-6.771 8.375,-6.971 8.254,-7.151 8.101,-7.304 7.921,-7.425 7.721,-7.508 7.508,-7.55 7.4,-7.55
  pour cut-out: 7.4,-6.45 6.3,-6.45 6.3,-6.342 6.342,-6.129 6.425,-5.929 6.546,-5.749 6.699,-5.596 6.879,-5.475 7.079,-5.392 7.292,-5.35 7.4,-5.35
  pour cut-out: 7.4,-6.45 7.4,-7.55 7.292,-7.55 7.079,-7.508 6.879,-7.425 6.699,-7.304 6.546,-7.151 6.425,-6.971 6.342,-6.771 6.3,-6.558 6.3,-6.45
  pour cut-out: 7.4,-6.45 7.4,-5.35 7.508,-5.35 7.721,-5.392 7.921,-5.475 8.101,-5.596 8.254,-5.749 8.375,-5.929 8.458,-6.129 8.5,-6.342 8.5,-6.45
Top Overlay:
  circle w0.3: c-3,-4.6 r0.1
  lines w0.15: -5,-4 5,-4 5,4 -5,4 -5,-4
  lines w0.2: -9,-8 -9,8 9,8 9,-8 -9,-8
  text "OCXO" at -1.3,4.275 h0.7
Top Solder:
  drawing of 16 lines, arcs and shapes, not listed
Mechanical 15:
  circle w0.3: c-3,-2 r0.141
  lines w0.15: -1.25,0 1.25,0 ; 0,-1.25 0,1.25 ; -5,-4 -5,4 5,4 5,-4 -5,-4
  text ".Designator" at 0,0 h0.55
3D body: height 4.1, standoff 0, extent -4.85,-3.75 4.85,3.75
3D body: height 4.2, standoff 4.1, extent -3.492,-2.498 -2.496,-1.5
3D body: height 0.4, standoff 0, extent -4.9,-3 -4.75,3
3D body: height 0.4, standoff 0, extent 4.75,-3 4.9,3
3D body "Rakon_box_v2.STEP": height 10, standoff -1.5, extent -8.05,-7.011 7.95,6.989

## AOCJYR-10.000MHz_v2 [mm] "Updated thermal housing hole size from reference 0.9mm to 1.5mm"
pads (8):
  round 1.5 hole 1.5 unplated: 0(-7.5,6.45) 0(-7.5,-6.45) 0(7.4,-6.45) 0(7.4,6.45)
  round 1.6 smd mask+0.05: 1(-3,-2) 2(3,-2) 3(3,2) 4(-3,2)
Top Layer:
  pour cut-out: 7.4,-6.45 7.4,-5.35 7.508,-5.35 7.721,-5.392 7.921,-5.475 8.101,-5.596 8.254,-5.749 8.375,-5.929 8.458,-6.129 8.5,-6.342 8.5,-6.45
  pour cut-out: 7.4,-6.45 7.4,-7.55 7.292,-7.55 7.079,-7.508 6.879,-7.425 6.699,-7.304 6.546,-7.151 6.425,-6.971 6.342,-6.771 6.3,-6.558 6.3,-6.45
  pour cut-out: 7.4,-6.45 6.3,-6.45 6.3,-6.342 6.342,-6.129 6.425,-5.929 6.546,-5.749 6.699,-5.596 6.879,-5.475 7.079,-5.392 7.292,-5.35 7.4,-5.35
  pour cut-out: 7.4,-6.45 8.5,-6.45 8.5,-6.558 8.458,-6.771 8.375,-6.971 8.254,-7.151 8.101,-7.304 7.921,-7.425 7.721,-7.508 7.508,-7.55 7.4,-7.55
  pour cut-out: -7.5,-6.45 -6.4,-6.45 -6.4,-6.558 -6.442,-6.771 -6.525,-6.971 -6.646,-7.151 -6.799,-7.304 -6.979,-7.425 -7.179,-7.508 -7.392,-7.55 -7.5,-7.55
  pour cut-out: -7.5,-6.45 -8.6,-6.45 -8.6,-6.342 -8.558,-6.129 -8.475,-5.929 -8.354,-5.749 -8.201,-5.596 -8.021,-5.475 -7.821,-5.392 -7.608,-5.35 -7.5,-5.35
  pour cut-out: -7.5,-6.45 -7.5,-7.55 -7.608,-7.55 -7.821,-7.508 -8.021,-7.425 -8.201,-7.304 -8.354,-7.151 -8.475,-6.971 -8.558,-6.771 -8.6,-6.558 -8.6,-6.45
  pour cut-out: -7.5,-6.45 -7.5,-5.35 -7.392,-5.35 -7.179,-5.392 -6.979,-5.475 -6.799,-5.596 -6.646,-5.749 -6.525,-5.929 -6.442,-6.129 -6.4,-6.342 -6.4,-6.45
  pour cut-out: -7.5,6.45 -6.4,6.45 -6.4,6.342 -6.442,6.129 -6.525,5.929 -6.646,5.749 -6.799,5.596 -6.979,5.475 -7.179,5.392 -7.392,5.35 -7.5,5.35
  pour cut-out: -7.5,6.45 -8.6,6.45 -8.6,6.558 -8.558,6.771 -8.475,6.971 -8.354,7.151 -8.201,7.304 -8.021,7.425 -7.821,7.508 -7.608,7.55 -7.5,7.55
  pour cut-out: -7.5,6.45 -7.5,5.35 -7.608,5.35 -7.821,5.392 -8.021,5.475 -8.201,5.596 -8.354,5.749 -8.475,5.929 -8.558,6.129 -8.6,6.342 -8.6,6.45
  pour cut-out: -7.5,6.45 -7.5,7.55 -7.392,7.55 -7.179,7.508 -6.979,7.425 -6.799,7.304 -6.646,7.151 -6.525,6.971 -6.442,6.771 -6.4,6.558 -6.4,6.45
  pour cut-out: 7.4,6.45 8.5,6.45 8.5,6.342 8.458,6.129 8.375,5.929 8.254,5.749 8.101,5.596 7.921,5.475 7.721,5.392 7.508,5.35 7.4,5.35
  pour cut-out: 7.4,6.45 6.3,6.45 6.3,6.558 6.342,6.771 6.425,6.971 6.546,7.151 6.699,7.304 6.879,7.425 7.079,7.508 7.292,7.55 7.4,7.55
  pour cut-out: 7.4,6.45 7.4,5.35 7.292,5.35 7.079,5.392 6.879,5.475 6.699,5.596 6.546,5.749 6.425,5.929 6.342,6.129 6.3,6.342 6.3,6.45
  pour cut-out: 7.4,6.45 7.4,7.55 7.508,7.55 7.721,7.508 7.921,7.425 8.101,7.304 8.254,7.151 8.375,6.971 8.458,6.771 8.5,6.558 8.5,6.45
  pour cut-out: 4.9,-0.5 4.9,3.9 -4.9,3.9 -4.9,-3.9 1.525,-3.9 1.525,-0.5
Top Overlay:
  circle w0.3: c-3,-4.6 r0.1
  lines w0.15: -5,-4 -5,4 5,4 5,-4 -5,-4
  lines w0.2: -9,-8 9,-8 9,8 -9,8 -9,-8
  text "OCXO" at -1.3,4.275 h0.7
Top Solder:
  drawing of 16 lines, arcs and shapes, not listed
Mechanical 15:
  circle w0.3: c-3,-2 r0.141
  lines w0.15: -1.25,0 1.25,0 ; 0,-1.25 0,1.25 ; -5,-4 5,-4 5,4 -5,4 -5,-4
  text ".Designator" at 0,0 h0.55
3D body "Rakon_box_v2.STEP": height 10, standoff -1.5, extent -8.05,-7.011 7.95,6.989
3D body: height 0.4, standoff 0, extent 4.75,-3 4.9,3
3D body: height 0.4, standoff 0, extent -4.9,-3 -4.75,3
3D body: height 4.2, standoff 4.1, extent -3.492,-2.498 -2.496,-1.5
3D body: height 4.1, standoff 0, extent -4.85,-3.75 4.85,3.75